# Altium footprint library Opt_S.PcbLib: 6 footprints
Each footprint in its own frame and in the unit in brackets; x right, y up, seen from the top. Pads: shape width x height; smd on the part's side, far side on the other; paste and mask are expansions set on the pad; w line width, h text height; cw(c..) or ccw(c..) is an arc to the next point about the centre after c.
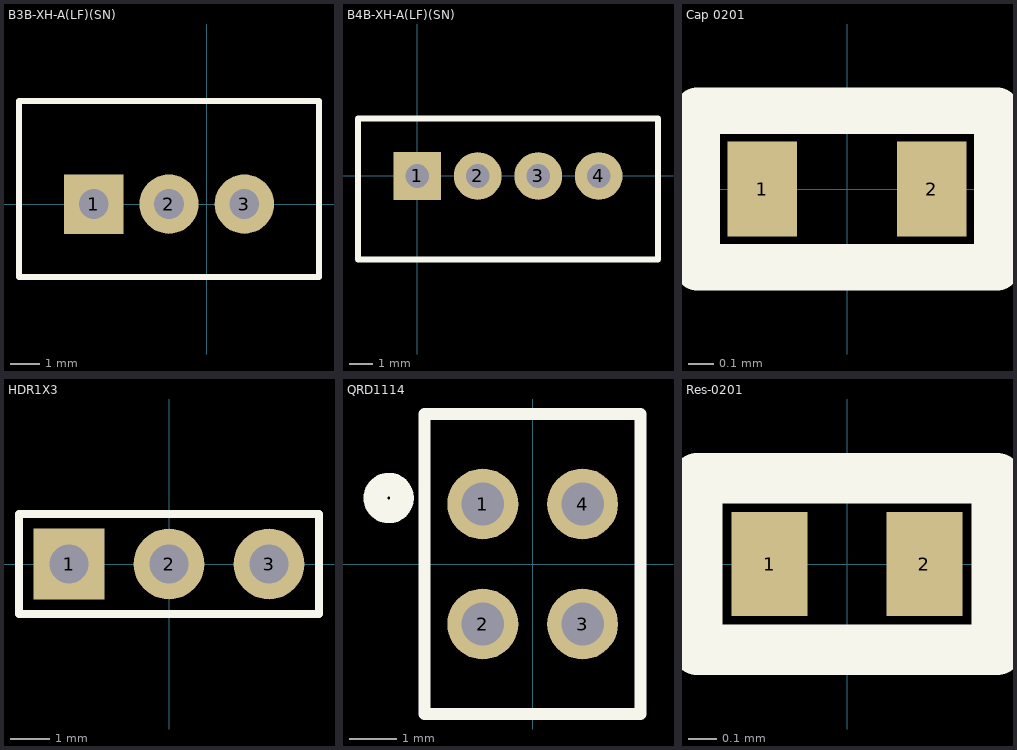
[diagram p0: the footprints below, top view; thin cyan lines are the x and y axes]

## B3B-XH-A(LF)(SN) [mm]
pads (3):
  rect 2x2 hole 1: 1(-3.81,0)
  round 2 hole 1: 2(-1.27,0) 3(1.27,0)
Top Overlay:
  lines w0.2: -6.325,-2.464 3.785,-2.464 3.785,3.48 -6.325,3.48 -6.325,-2.464
3D body "User Library-jst-b3b-xh-a.step": height 7, standoff -3.4, extent -6.22,-2.362 3.68,3.388

## B4B-XH-A(LF)(SN) [mm]
pads (4):
  rect 2x2 hole 1: 1(0,0)
  round 2 hole 1: 2(2.54,0) 3(5.08,0) 4(7.62,0)
Top Overlay:
  lines w0.254: -2.489,-3.505 10.109,-3.505 10.109,2.413 -2.489,2.413 -2.489,-3.505
3D body "B4B-XH-A.STEP": height 7.16, standoff -3.24, extent -2.39,-3.429 10.01,2.321

## Cap 0201 [mm]
pads (2):
  rect 0.27x0.37 smd: 1(-0.33,0) 2(0.33,0)
Top Overlay:
  lines w0.18: -0.584,-0.305 -0.584,0.305 0.584,0.305 0.584,-0.305 -0.584,-0.305
3D body "GRM033R60J104KE19D--3DModel-STEP-56544.STEP": height 0.21, standoff -0.09, extent -0.3,-0.165 0.3,0.165

## HDR1X3 [mm]
pads (3):
  rect 1.8x1.8 hole 1: 1(-2.54,0)
  round 1.8 hole 1: 2(0,0) 3(2.54,0)
Top Overlay:
  lines w0.2: -3.81,-1.27 3.81,-1.27 3.81,1.27 -3.81,1.27 -3.81,-1.27
3D body "pin_header_3.STEP": height 11.39, standoff -2.61, extent -3.81,-1.295 3.81,1.245

## QRD1114 [mm]
pads (4):
  round 1.5 hole 0.9: 1(-1.055,1.27) 2(-1.055,-1.27) 3(1.055,-1.27) 4(1.055,1.27)
Top Overlay:
  circle w0.5: c-3.048,1.397 r0.284
  lines w0.254: -2.286,-3.175 -2.286,3.175 2.286,3.175 2.286,-3.175 -2.286,-3.175
3D body "QRD1114.STEP": height 4.65, standoff -2, extent -2.205,-3.05 2.195,3.05

## Res-0201 [mm]
pads (2):
  rect 0.27x0.37 smd: 1(-0.275,0) 2(0.275,0)
Top Overlay:
  lines w0.18: -0.533,-0.305 0.533,-0.305 0.533,0.305 -0.533,0.305 -0.533,-0.305
3D body "User Library-0201(0603M) Res.step": height 0.29, standoff -0.02, extent -0.305,-0.152 0.305,0.153